# Altium footprint library Silabs.PcbLib: 18 footprints (part 2 of 2)
Each footprint in its own frame and in the unit in brackets; x right, y up, seen from the top. Pads: shape width x height; smd on the part's side, far side on the other; paste and mask are expansions set on the pad; w line width, h text height; cw(c..) or ccw(c..) is an arc to the next point about the centre after c.
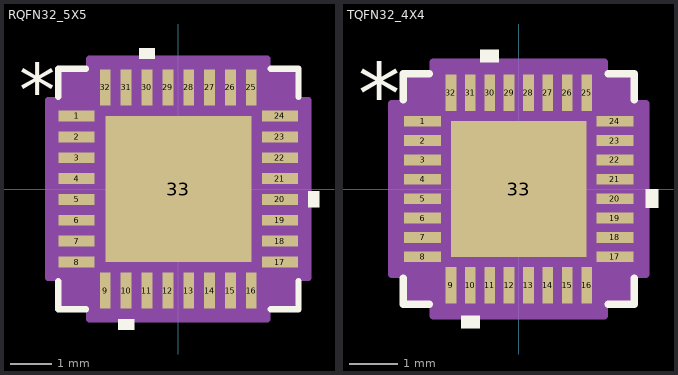
[diagram p1: the footprints below, top view; thin cyan lines are the x and y axes]

## RQFN32_5X5 [mm]
pads (33):
  rect 0.86x0.26 smd paste-0.13 mask+0: 1(-2.435,1.75) 2(-2.435,1.25) 3(-2.435,0.75) 4(-2.435,0.25) 5(-2.435,-0.25) 6(-2.435,-0.75) 7(-2.435,-1.25) 8(-2.435,-1.75) 17(2.435,-1.75) 18(2.435,-1.25) 19(2.435,-0.75) 20(2.435,-0.25) 21(2.435,0.25) 22(2.435,0.75) 23(2.435,1.25) 24(2.435,1.75)
  rect 0.26x0.86 smd paste-0.13 mask+0: 9(-1.75,-2.435) 10(-1.25,-2.435) 11(-0.75,-2.435) 12(-0.25,-2.435) 13(0.25,-2.435) 14(0.75,-2.435) 15(1.25,-2.435) 16(1.75,-2.435) 25(1.75,2.435) 26(1.25,2.435) 27(0.75,2.435) 28(0.25,2.435) 29(-0.25,2.435) 30(-0.75,2.435) 31(-1.25,2.435) 32(-1.75,2.435)
  rect 3.5x3.5 smd paste-1.75 mask+0: 33(0,0)
Top Overlay:
  region: -0.56,3.119 -0.941,3.119 -0.941,3.373 -0.56,3.373
  region: 3.119,-0.059 3.373,-0.059 3.373,-0.44 3.119,-0.44
  region: -1.06,-3.119 -1.441,-3.119 -1.441,-3.373 -1.06,-3.373
  lines w0.152: -2.881,-2.212 -2.881,-2.881 -2.212,-2.881 ; -2.881,2.212 -2.881,2.881 -2.212,2.881 ; 2.212,-2.881 2.881,-2.881 2.881,-2.212 ; 2.212,2.881 2.881,2.881 2.881,2.212
  text "*" at -3.818,1.746 h1.27
Top Paste:
  region: 1.65,-0.1 0.1,-0.1 0.1,-1.65 1.65,-1.65
  region: 1.65,1.65 0.1,1.65 0.1,0.1 1.65,0.1
  region: -0.1,-0.1 -1.65,-0.1 -1.65,-1.65 -0.1,-1.65
  region: -0.1,1.65 -1.65,1.65 -1.65,0.1 -0.1,0.1
  region: -1.62,2.865 -1.88,2.865 -1.88,2.005 -1.62,2.005
  region: -1.12,2.865 -1.38,2.865 -1.38,2.005 -1.12,2.005
  region: -0.62,2.865 -0.88,2.865 -0.88,2.005 -0.62,2.005
  region: -0.12,2.865 -0.38,2.865 -0.38,2.005 -0.12,2.005
  region: 0.38,2.865 0.12,2.865 0.12,2.005 0.38,2.005
  region: 0.88,2.865 0.62,2.865 0.62,2.005 0.88,2.005
  region: 1.38,2.865 1.12,2.865 1.12,2.005 1.38,2.005
  region: 1.88,2.865 1.62,2.865 1.62,2.005 1.88,2.005
  region: 2.865,1.88 2.005,1.88 2.005,1.62 2.865,1.62
  region: 2.865,1.38 2.005,1.38 2.005,1.12 2.865,1.12
  region: 2.865,0.88 2.005,0.88 2.005,0.62 2.865,0.62
  region: 2.865,0.38 2.005,0.38 2.005,0.12 2.865,0.12
  region: 2.865,-0.12 2.005,-0.12 2.005,-0.38 2.865,-0.38
  region: 2.865,-0.62 2.005,-0.62 2.005,-0.88 2.865,-0.88
  region: 2.865,-1.12 2.005,-1.12 2.005,-1.38 2.865,-1.38
  region: 2.865,-1.62 2.005,-1.62 2.005,-1.88 2.865,-1.88
  region: 1.88,-2.005 1.62,-2.005 1.62,-2.865 1.88,-2.865
  region: 1.38,-2.005 1.12,-2.005 1.12,-2.865 1.38,-2.865
  region: 0.88,-2.005 0.62,-2.005 0.62,-2.865 0.88,-2.865
  region: 0.38,-2.005 0.12,-2.005 0.12,-2.865 0.38,-2.865
  region: -0.12,-2.005 -0.38,-2.005 -0.38,-2.865 -0.12,-2.865
  region: -0.62,-2.005 -0.88,-2.005 -0.88,-2.865 -0.62,-2.865
  region: -1.12,-2.005 -1.38,-2.005 -1.38,-2.865 -1.12,-2.865
  region: -1.62,-2.005 -1.88,-2.005 -1.88,-2.865 -1.62,-2.865
  region: -2.005,-1.62 -2.865,-1.62 -2.865,-1.88 -2.005,-1.88
  region: -2.005,-1.12 -2.865,-1.12 -2.865,-1.38 -2.005,-1.38
  region: -2.005,-0.62 -2.865,-0.62 -2.865,-0.88 -2.005,-0.88
  region: -2.005,-0.12 -2.865,-0.12 -2.865,-0.38 -2.005,-0.38
  region: -2.005,0.38 -2.865,0.38 -2.865,0.12 -2.005,0.12
  region: -2.005,0.88 -2.865,0.88 -2.865,0.62 -2.005,0.62
  region: -2.005,1.38 -2.865,1.38 -2.865,1.12 -2.005,1.12
  region: -2.005,1.88 -2.865,1.88 -2.865,1.62 -2.005,1.62
Top Solder:
  region: -1.62,2.865 -1.88,2.865 -1.88,2.005 -1.62,2.005
  region: -1.12,2.865 -1.38,2.865 -1.38,2.005 -1.12,2.005
  region: -0.62,2.865 -0.88,2.865 -0.88,2.005 -0.62,2.005
  region: -0.12,2.865 -0.38,2.865 -0.38,2.005 -0.12,2.005
  region: 0.38,2.865 0.12,2.865 0.12,2.005 0.38,2.005
  region: 0.88,2.865 0.62,2.865 0.62,2.005 0.88,2.005
  region: 1.38,2.865 1.12,2.865 1.12,2.005 1.38,2.005
  region: 1.88,2.865 1.62,2.865 1.62,2.005 1.88,2.005
  region: 2.865,1.88 2.005,1.88 2.005,1.62 2.865,1.62
  region: 2.865,1.38 2.005,1.38 2.005,1.12 2.865,1.12
  region: 2.865,0.88 2.005,0.88 2.005,0.62 2.865,0.62
  region: 2.865,0.38 2.005,0.38 2.005,0.12 2.865,0.12
  region: 2.865,-0.12 2.005,-0.12 2.005,-0.38 2.865,-0.38
  region: 2.865,-0.62 2.005,-0.62 2.005,-0.88 2.865,-0.88
  region: 2.865,-1.12 2.005,-1.12 2.005,-1.38 2.865,-1.38
  region: 2.865,-1.62 2.005,-1.62 2.005,-1.88 2.865,-1.88
  region: 1.88,-2.005 1.62,-2.005 1.62,-2.865 1.88,-2.865
  region: 1.38,-2.005 1.12,-2.005 1.12,-2.865 1.38,-2.865
  region: 0.88,-2.005 0.62,-2.005 0.62,-2.865 0.88,-2.865
  region: 0.38,-2.005 0.12,-2.005 0.12,-2.865 0.38,-2.865
  region: -0.12,-2.005 -0.38,-2.005 -0.38,-2.865 -0.12,-2.865
  region: -0.62,-2.005 -0.88,-2.005 -0.88,-2.865 -0.62,-2.865
  region: -1.12,-2.005 -1.38,-2.005 -1.38,-2.865 -1.12,-2.865
  region: -1.62,-2.005 -1.88,-2.005 -1.88,-2.865 -1.62,-2.865
  region: -2.005,-1.62 -2.865,-1.62 -2.865,-1.88 -2.005,-1.88
  region: -2.005,-1.12 -2.865,-1.12 -2.865,-1.38 -2.005,-1.38
  region: -2.005,-0.62 -2.865,-0.62 -2.865,-0.88 -2.005,-0.88
  region: -2.005,-0.12 -2.865,-0.12 -2.865,-0.38 -2.005,-0.38
  region: -2.005,0.38 -2.865,0.38 -2.865,0.12 -2.005,0.12
  region: -2.005,0.88 -2.865,0.88 -2.865,0.62 -2.005,0.62
  region: -2.005,1.38 -2.865,1.38 -2.865,1.12 -2.005,1.12
  region: -2.005,1.88 -2.865,1.88 -2.865,1.62 -2.005,1.62
Mechanical 13:
  lines w0.025: -2.5,1.23 -1.23,2.5 ; -2.5,-2.5 -2.5,2.5 2.5,2.5 2.5,-2.5 -2.5,-2.5
  text "*" at -2.068,1.365 h1.27
Mechanical 15:
  region: -2.134,-2.754 -2.754,-2.754 -2.754,-2.134 -3.119,-2.134 -3.119,2.134 -2.754,2.134 -2.754,2.754 -2.134,2.754 -2.134,3.119 2.134,3.119 2.134,2.754 2.754,2.754 2.754,2.134 3.119,2.134 3.119,-2.134 2.754,-2.134 2.754,-2.754 2.134,-2.754 2.134,-3.119 -2.134,-3.119
  lines w0.152: -3.119,-2.134 -3.119,2.134 -2.754,2.134 -2.754,2.754 -2.134,2.754 -2.134,3.119 2.134,3.119 2.134,2.754 2.754,2.754 2.754,2.134 3.119,2.134 3.119,-2.134 2.754,-2.134 2.754,-2.754 2.134,-2.754 2.134,-3.119 -2.134,-3.119 -2.134,-2.754 -2.754,-2.754 -2.754,-2.134 -3.119,-2.134
3D body "RQFN32_5X5.step": height 0.9, standoff 0, extent -2.551,-2.551 2.551,2.551

## TQFN32_4X4 [mm]
pads (33):
  rect 0.76x0.22 smd paste-0.11 mask+0: 1(-1.985,1.4) 2(-1.985,1) 3(-1.985,0.6) 4(-1.985,0.2) 5(-1.985,-0.2) 6(-1.985,-0.6) 7(-1.985,-1) 8(-1.985,-1.4) 17(1.985,-1.4) 18(1.985,-1) 19(1.985,-0.6) 20(1.985,-0.2) 21(1.985,0.2) 22(1.985,0.6) 23(1.985,1) 24(1.985,1.4)
  rect 0.22x0.76 smd paste-0.11 mask+0: 9(-1.4,-1.985) 10(-1,-1.985) 11(-0.6,-1.985) 12(-0.2,-1.985) 13(0.2,-1.985) 14(0.6,-1.985) 15(1,-1.985) 16(1.4,-1.985) 25(1.4,1.985) 26(1,1.985) 27(0.6,1.985) 28(0.2,1.985) 29(-0.2,1.985) 30(-0.6,1.985) 31(-1,1.985) 32(-1.4,1.985)
  rect 2.8x2.8 smd paste-1.387 mask+0: 33(0,0)
Top Overlay:
  region: -0.409,2.619 -0.79,2.619 -0.79,2.873 -0.409,2.873
  region: 2.619,-0.009 2.873,-0.009 2.873,-0.39 2.619,-0.39
  region: -0.81,-2.619 -1.191,-2.619 -1.191,-2.873 -0.81,-2.873
  lines w0.152: -2.381,-1.842 -2.381,-2.381 -1.842,-2.381 ; -2.381,1.842 -2.381,2.381 -1.842,2.381 ; 1.842,-2.381 2.381,-2.381 2.381,-1.842 ; 1.842,2.381 2.381,2.381 2.381,1.842
  text "*" at -3.317,1.346 h1.27
Top Paste:
  region: 1.3,-0.1 0.1,-0.1 0.1,-1.3 1.3,-1.3
  region: 1.3,1.3 0.1,1.3 0.1,0.1 1.3,0.1
  region: -0.1,-0.1 -1.3,-0.1 -1.3,-1.3 -0.1,-1.3
  region: -0.1,1.3 -1.3,1.3 -1.3,0.1 -0.1,0.1
Mechanical 13:
  lines w0.025: -2,0.73 -0.73,2 ; -2,-2 -2,2 2,2 2,-2 -2,-2
  text "*" at -1.669,0.965 h1.27
Mechanical 15:
  region: -1.764,-2.254 -2.254,-2.254 -2.254,-1.764 -2.619,-1.764 -2.619,1.764 -2.254,1.764 -2.254,2.254 -1.764,2.254 -1.764,2.619 1.764,2.619 1.764,2.254 2.254,2.254 2.254,1.764 2.619,1.764 2.619,-1.764 2.254,-1.764 2.254,-2.254 1.764,-2.254 1.764,-2.619 -1.764,-2.619
  lines w0.152: -2.619,-1.764 -2.619,1.764 -2.254,1.764 -2.254,2.254 -1.764,2.254 -1.764,2.619 1.764,2.619 1.764,2.254 2.254,2.254 2.254,1.764 2.619,1.764 2.619,-1.764 2.254,-1.764 2.254,-2.254 1.764,-2.254 1.764,-2.619 -1.764,-2.619 -1.764,-2.254 -2.254,-2.254 -2.254,-1.764 -2.619,-1.764
3D body "TQFN32_4X4.step": height 0.9, standoff 0, extent -2.051,-2.051 2.051,2.051